# Altium schematic symbol library GRM155Z71A225KE01D.SchLib: 1 symbol
Pins are listed as number, name and electrical type; pins without a type are passive.

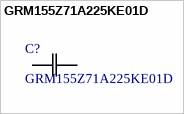
[diagram p0: symbol GRM155Z71A225KE01D]

## GRM155Z71A225KE01D
designator C?
Description; Manufacturer_Name: Murata; Copyright: Copyright (C) 2026 Ultra Librarian. All rights reserved.; Manufacturer_Part_Number: GRM155Z71A225KE01D
footprint CAP_GRM155Z_MUR
pins: 1, 2